# Altium footprint library IC.PcbLib: 19 footprints (part 2 of 2)
Each footprint in its own frame and in the unit in brackets; x right, y up, seen from the top. Pads: shape width x height; smd on the part's side, far side on the other; paste and mask are expansions set on the pad; w line width, h text height; cw(c..) or ccw(c..) is an arc to the next point about the centre after c.
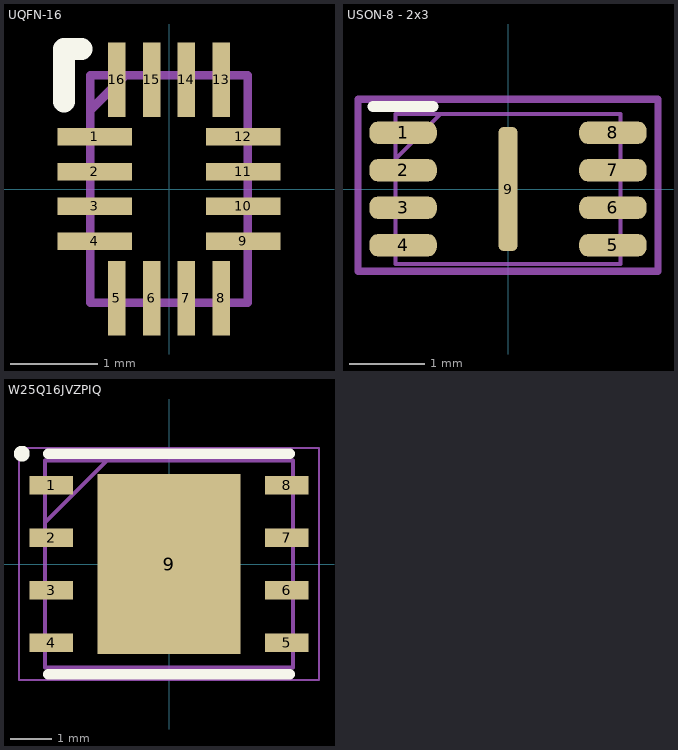
[diagram p1: the footprints below, top view; thin cyan lines are the x and y axes]

## UQFN-16 [mm] "1.85x2.65"
pads (16):
  rect 0.85x0.2 smd mask-2539.97: 1(-0.85,0.6) 4(-0.85,-0.6) 9(0.85,-0.6) 12(0.85,0.6)
  rect 0.85x0.2 smd paste-0.02 mask+0.035: 2(-0.85,0.2) 3(-0.85,-0.2) 10(0.85,-0.2) 11(0.85,0.2)
  rect 0.2x0.85 smd mask-2539.97: 5(-0.6,-1.25) 8(0.6,-1.25) 13(0.6,1.25) 16(-0.6,1.25)
  rect 0.2x0.85 smd paste-0.02 mask+0.035: 6(-0.2,-1.25) 7(0.2,-1.25) 14(0.2,1.25) 15(-0.2,1.25)
Top Overlay:
  lines w0.254: -1.2,1 -1.2,1.6 -1,1.6
Top Solder:
  region: 0.46,-1.715 0.74,-1.715 0.74,-0.725 0.46,-0.725
  region: -0.74,-1.715 -0.46,-1.715 -0.46,-0.725 -0.74,-0.725
  region: -0.74,0.725 -0.46,0.725 -0.46,1.715 -0.74,1.715
  region: -1.315,0.46 -1.315,0.74 -0.385,0.74 -0.385,0.46
  region: 0.385,0.46 0.385,0.74 1.315,0.74 1.315,0.46
  region: 0.46,0.725 0.74,0.725 0.74,1.715 0.46,1.715
  region: 0.385,-0.74 0.385,-0.46 1.315,-0.46 1.315,-0.74
  region: -1.315,-0.74 -1.315,-0.46 -0.385,-0.46 -0.385,-0.74
Mechanical 15:
  lines w0.1: -0.9,0.9 -0.5,1.3 ; -0.9,-1.3 -0.9,1.3 0.9,1.3 0.9,-1.3 -0.9,-1.3
3D body "TMUX1574RSVR.stp": height 0.55, standoff 0, extent -0.9,-1.3 0.9,1.3

## USON-8 - 2x3 [mm] "8-Lead Plastic Ultra Thin Small Outline No Lead Package (NP) - [2mm x 3mm]  Body [USON] / [Also called UDFN]"
pads (9):
  rrect80% 0.9x0.3 smd mask+0.04: 1(-1.4,0.75) 2(-1.4,0.25) 3(-1.4,-0.25) 4(-1.4,-0.75) 5(1.4,-0.75) 6(1.4,-0.25) 7(1.4,0.25) 8(1.4,0.75)
  rrect50% 0.25x1.65 smd mask+0.04: 9(0,0)
Top Overlay:
  lines w0.15: -1.8,1.1 -1,1.1
Mechanical 13:
  lines w0.05: -1.5,0.4 -0.9,1 ; -1.5,-1 1.5,-1 1.5,1 -1.5,1 -1.5,-1
Mechanical 15:
  lines w0.1: -2,-1.1 2,-1.1 2,1.2 -2,1.2 -2,-1.1
3D body "USON-8(2x3) v2.step": height 0.55, standoff 0, extent -1.5,-1 1.5,1

## W25Q16JVZPIQ [mm] "NOR Flash spiFlash, 3V, 16M-bit, 4Kb Uniform Sector"
pads (9):
  rect 1.05x0.45 smd: 1(-2.85,1.905) 2(-2.85,0.635) 3(-2.85,-0.635) 4(-2.85,-1.905) 5(2.85,-1.905) 6(2.85,-0.635) 7(2.85,0.635) 8(2.85,1.905)
  rect 3.45x4.35 smd: 9(0,0)
Top Overlay:
  circle w0.25: c-3.556,2.667 r0.065
  lines w0.254: -2.921,-2.667 2.921,-2.667 ; -2.921,2.667 2.921,2.667
Mechanical 13:
  lines w0.1: -3,1 -1.5,2.5 ; -3,-2.5 -3,2.5 3,2.5 3,-2.5 -3,-2.5
Mechanical 15:
  lines w0.05: -3.625,-2.8 -3.625,2.8 3.625,2.8 3.625,-2.8 -3.625,-2.8
3D body "W25Q16JVZPIQ.stp": height 0.8, standoff 0, extent -3.05,-2.5 3.05,2.5